# EAGLE library part INMP441 (library INMP441)
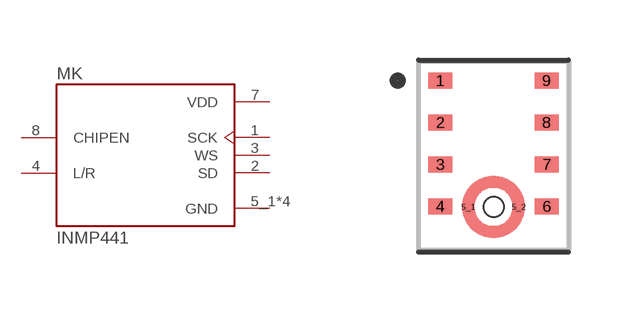
[diagram p0: symbol with the pads of MIC_INMP441; footprint MIC_INMP441]

Designator prefix MK

## INMP441 (DATASHEET_URL: https://s3.amazonaws.com/snapeda/datasheet/INMP441_TDK_InvenSense.pdf; DESCRIPTION: EVAL BOARD MEMS MIC INMP441; MANUFACTURER: TDK InvenSense; MAXIMUM_PACKAGE_HEIGHT: 1.05 mm; MPN: INMP441; PARTREV: 1.1; SOURCE_URL: https://www.snapeda.com/parts/INMP441/TDK/view-part/; STANDARD: Manufacturer Recommendations)  [MIC_INMP441]
1  SCK  in
2  SD
3  WS  in
4  L/R  in
5_1  GND  pwr
5_2  GND  pwr
6  GND  pwr
7  VDD  pwr
8  CHIPEN  in
9  GND  pwr

## Footprint MIC_INMP441 (pad centres in mm)
smd 0.6 x 0.4: 1 -1.33,1.87; 2 -1.33,0.82; 3 -1.33,-0.23; 4 -1.33,-1.28; 6 1.33,-1.28; 7 1.33,-0.23; 8 1.33,0.82; 9 1.33,1.87
smd 0.1 x 0.1: 5_1 -0.63,-1.29; 5_2 0.63,-1.29
hole 0.5 at 0,-1.29